# Altium footprint library WR-PHD_Socket Header.PcbLib: 279 footprints (part 1 of 18)
Each footprint in its own frame and in the unit in brackets; x right, y up, seen from the top. Pads: shape width x height; smd on the part's side, far side on the other; paste and mask are expansions set on the pad; w line width, h text height; cw(c..) or ccw(c..) is an arc to the next point about the centre after c.
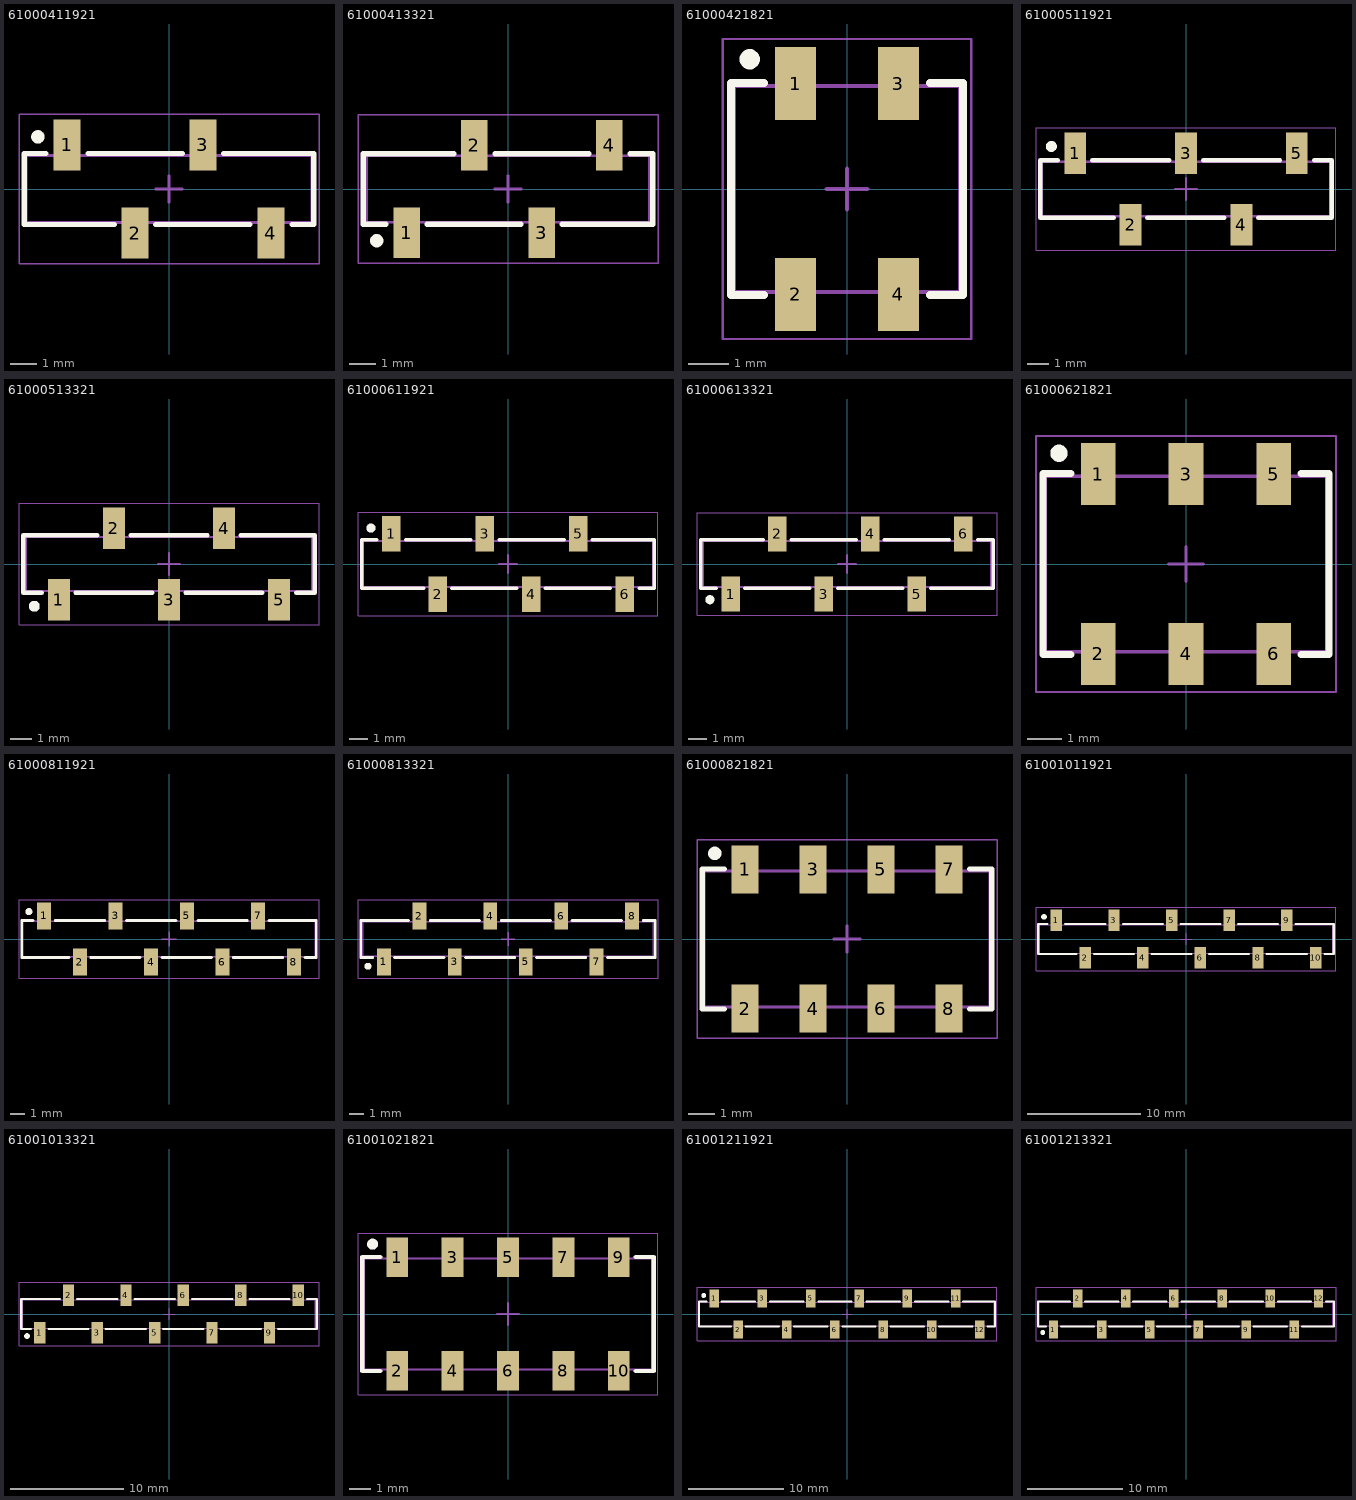
[diagram p0: the footprints below, top view; thin cyan lines are the x and y axes]

## 61000411921 [mm] "Socket Header, Pitch 2.54 mm, SMT, Vertical, single row, 4p"
height 7.5
pads (4):
  rect 1x1.91 smd: 1(-3.81,1.645) 2(-1.27,-1.645) 3(1.27,1.645) 4(3.81,-1.645)
Top Overlay:
  circle w0.25: c-4.9,1.95 r0.125
  lines w0.2: -4.6,1.325 -5.405,1.325 -5.405,-1.325 -2.04,-1.325 ; -3.02,1.325 0.5,1.325 ; -0.5,-1.325 3.02,-1.325 ; 2.04,1.325 5.405,1.325 5.405,-1.325 4.6,-1.325
Top Component Outline:
  lines w0.1: -4.06,1.25 -4.06,2.025 -3.56,2.025 -3.56,1.25 ; -1.52,-1.25 -1.52,-2.025 -1.02,-2.025 -1.02,-1.25 ; 1.02,1.25 1.02,2.025 1.52,2.025 1.52,1.25 ; 3.56,-1.25 3.56,-2.025 4.06,-2.025 4.06,-1.25 ; -5.33,-1.25 -5.33,1.25 5.33,1.25 5.33,-1.25 -5.33,-1.25
Top Designator:
  text ".Designator" at -3.647,-0.357 h1
Top Courtyard:
  lines w0.05: -5.605,-2.8 5.605,-2.8 5.605,2.8 -5.605,2.8 -5.605,-2.8
Top Component Center:
  lines w0.1: -0.5,0 0.5,0 ; 0,-0.5 0,0.5
3D body "61000411921.stp": height 7.5, standoff 0, extent -5.33,-2.025 5.33,2.025

## 61000413321 [mm] "Socket Header, Pitch 2.54 mm, SMT, Vertical, single row, 4p"
height 7.5
pads (4):
  rect 1x1.91 smd: 1(-3.81,-1.645) 2(-1.27,1.645) 3(1.27,-1.645) 4(3.81,1.645)
Top Overlay:
  circle w0.25: c-4.95,-1.95 r0.125
  lines w0.2: -4.6,-1.325 -5.455,-1.325 -5.455,1.325 -2.05,1.325 ; -3.05,-1.325 0.49,-1.325 ; -0.49,1.325 3.05,1.325 ; 2.05,-1.325 5.405,-1.325 ; 4.6,1.325 5.405,1.325 ; 5.455,-1.325 5.455,1.325
Top Component Outline:
  lines w0.1: -4.06,-1.25 -4.06,-2.025 -3.56,-2.025 -3.56,-1.25 ; -1.52,1.25 -1.52,2.025 -1.02,2.025 -1.02,1.25 ; 1.02,-1.25 1.02,-2.025 1.52,-2.025 1.52,-1.25 ; 3.56,1.25 3.56,2.025 4.06,2.025 4.06,1.25 ; -5.33,-1.25 -5.33,1.25 5.33,1.25 5.33,-1.25 -5.33,-1.25
Top Designator:
  text ".Designator" at -3.647,-0.357 h1
Top Courtyard:
  lines w0.05: -5.655,-2.8 5.655,-2.8 5.655,2.8 -5.655,2.8 -5.655,-2.8
Top Component Center:
  lines w0.1: -0.5,0 0.5,0 ; 0,-0.5 0,0.5
3D body "61000413321.stp": height 7.5, standoff 0, extent -5.33,-2.025 5.33,2.025

## 61000421821 [mm] "Socket Header, Pitch 2.54 mm, SMT, Vertical, dual row, 4p"
height 7.45
pads (4):
  rect 1x1.8 smd: 1(-1.27,2.6) 2(-1.27,-2.6) 3(1.27,2.6) 4(1.27,-2.6)
Top Overlay:
  circle w0.25: c-2.4,3.2 r0.125
  lines w0.2: -2.05,-2.615 -2.865,-2.615 -2.865,2.615 -2.05,2.615 ; 2.05,-2.615 2.865,-2.615 2.865,2.615 2.05,2.615
Top Component Outline:
  lines w0.1: -1.59,-2.54 -1.59,-3.35 -0.95,-3.35 -0.95,-2.54 ; -1.59,2.54 -1.59,3.35 -0.95,3.35 -0.95,2.54 ; 0.95,-2.54 0.95,-3.35 1.59,-3.35 1.59,-2.54 ; 0.95,2.54 0.95,3.35 1.59,3.35 1.59,2.54 ; -2.79,-2.54 2.79,-2.54 2.79,2.54 -2.79,2.54 -2.79,-2.54
Top Designator:
  text ".Designator" at -3.647,-0.357 h1
Top Courtyard:
  lines w0.05: -3.065,-3.7 -3.065,3.7 3.065,3.7 3.065,-3.7 -3.065,-3.7
Top Component Center:
  lines w0.1: -0.5,0 0.5,0 ; 0,-0.5 0,0.5
3D body "61000421821.stp": height 8.5, standoff 0, extent -2.54,-3.35 2.54,3.35

## 61000511921 [mm] "Socket Header, Pitch 2.54 mm, SMT, Vertical, single row, 5p"
height 7.5
pads (5):
  rect 1x1.91 smd: 1(-5.08,1.645) 2(-2.54,-1.645) 3(0,1.645) 4(2.54,-1.645) 5(5.08,1.645)
Top Overlay:
  circle w0.25: c-6.17,1.95 r0.125
  lines w0.2: -5.87,1.325 -6.675,1.325 -6.675,-1.325 -3.31,-1.325 ; -4.29,1.325 -0.77,1.325 ; -1.77,-1.325 1.75,-1.325 ; 0.79,1.325 4.31,1.325 ; 3.31,-1.325 6.675,-1.325 6.675,1.325 5.87,1.325
Top Component Outline:
  lines w0.1: -5.33,1.25 -5.33,2.025 -4.83,2.025 -4.83,1.25 ; -2.79,-1.25 -2.79,-2.025 -2.29,-2.025 -2.29,-1.25 ; -0.25,1.25 -0.25,2.025 0.25,2.025 0.25,1.25 ; 2.29,-1.25 2.29,-2.025 2.79,-2.025 2.79,-1.25 ; 4.83,1.25 4.83,2.025 5.33,2.025 5.33,1.25 ; -6.6,-1.25 6.6,-1.25 6.6,1.25 -6.6,1.25 -6.6,-1.25
Top Designator:
  text ".Designator" at -3.647,-0.357 h1
Top Courtyard:
  lines w0.05: -6.875,-2.8 6.875,-2.8 6.875,2.8 -6.875,2.8 -6.875,-2.8
Top Component Center:
  lines w0.1: -0.5,0 0.5,0 ; 0,-0.5 0,0.5
3D body "61000511921.stp": height 7.5, standoff 0, extent -6.6,-2.025 6.6,2.025

## 61000513321 [mm] "Socket Header, Pitch 2.54 mm, SMT, Vertical, single row, 5p"
height 7.5
pads (5):
  rect 1x1.91 smd: 1(-5.08,-1.645) 2(-2.54,1.645) 3(0,-1.645) 4(2.54,1.645) 5(5.08,-1.645)
Top Overlay:
  circle w0.25: c-6.22,-1.95 r0.125
  lines w0.2: -5.87,-1.325 -6.725,-1.325 -6.725,1.325 -3.32,1.325 ; -4.32,-1.325 -0.78,-1.325 ; -1.76,1.325 1.78,1.325 ; 0.76,-1.325 4.3,-1.325 ; 3.32,1.325 6.725,1.325 6.725,-1.325 5.87,-1.325
Top Component Outline:
  lines w0.1: -5.33,-1.25 -5.33,-2.025 -4.83,-2.025 -4.83,-1.25 ; -2.79,1.25 -2.79,2.025 -2.29,2.025 -2.29,1.25 ; -0.25,-1.25 -0.25,-2.025 0.25,-2.025 0.25,-1.25 ; 2.29,1.25 2.29,2.025 2.79,2.025 2.79,1.25 ; 4.83,-1.25 4.83,-2.025 5.33,-2.025 5.33,-1.25 ; -6.6,-1.25 6.6,-1.25 6.6,1.25 -6.6,1.25 -6.6,-1.25
Top Designator:
  text ".Designator" at -3.647,-0.357 h1
Top Courtyard:
  lines w0.05: -6.925,-2.8 -6.925,2.8 6.925,2.8 6.925,-2.8 -6.925,-2.8
Top Component Center:
  lines w0.1: -0.5,0 0.5,0 ; 0,-0.5 0,0.5
3D body "61000513321.stp": height 7.5, standoff 0, extent -6.6,-2.025 6.6,2.025

## 61000611921 [mm] "Socket Header, Pitch 2.54 mm, SMT, Vertical, single row, 6p"
height 7.5
pads (6):
  rect 1x1.91 smd: 1(-6.35,1.645) 2(-3.81,-1.645) 3(-1.27,1.645) 4(1.27,-1.645) 5(3.81,1.645) 6(6.35,-1.645)
Top Overlay:
  circle w0.25: c-7.44,1.95 r0.125
  lines w0.2: -7.14,1.325 -7.945,1.325 -7.945,-1.325 -4.58,-1.325 ; -5.56,1.325 -2.04,1.325 ; -3.04,-1.325 0.48,-1.325 ; -0.48,1.325 3.04,1.325 ; 2.04,-1.325 5.56,-1.325 ; 4.58,1.325 7.945,1.325 7.945,-1.325 7.14,-1.325
Top Component Outline:
  lines w0.1: -6.6,1.25 -6.6,2.025 -6.1,2.025 -6.1,1.25 ; -4.06,-1.25 -4.06,-2.025 -3.56,-2.025 -3.56,-1.25 ; -1.52,1.25 -1.52,2.025 -1.02,2.025 -1.02,1.25 ; 1.02,-1.25 1.02,-2.025 1.52,-2.025 1.52,-1.25 ; 3.56,1.25 3.56,2.025 4.06,2.025 4.06,1.25 ; 6.1,-1.25 6.1,-2.025 6.6,-2.025 6.6,-1.25 ; -7.87,-1.25 -7.87,1.25 7.87,1.25 7.87,-1.25 -7.87,-1.25
Top Designator:
  text ".Designator" at -3.647,-0.357 h1
Top Courtyard:
  lines w0.05: -8.145,-2.8 8.145,-2.8 8.145,2.8 -8.145,2.8 -8.145,-2.8
Top Component Center:
  lines w0.1: -0.5,0 0.5,0 ; 0,-0.5 0,0.5
3D body "61000611921.stp": height 7.5, standoff 0, extent -7.87,-2.025 7.87,2.025

## 61000613321 [mm] "Socket Header, Pitch 2.54 mm, SMT, Vertical, single row, 6p"
height 7.5
pads (6):
  rect 1x1.91 smd: 1(-6.35,-1.645) 2(-3.81,1.645) 3(-1.27,-1.645) 4(1.27,1.645) 5(3.81,-1.645) 6(6.35,1.645)
Top Overlay:
  circle w0.25: c-7.49,-1.95 r0.125
  lines w0.2: -7.14,-1.325 -7.995,-1.325 -7.995,1.325 -4.59,1.325 ; -5.59,-1.325 -2.05,-1.325 ; -3.03,1.325 0.51,1.325 ; -0.51,-1.325 3.03,-1.325 ; 2.05,1.325 5.59,1.325 ; 4.59,-1.325 7.995,-1.325 7.995,1.325 7.14,1.325
Top Component Outline:
  lines w0.1: -6.6,-1.25 -6.6,-2.025 -6.1,-2.025 -6.1,-1.25 ; -4.06,1.25 -4.06,2.025 -3.56,2.025 -3.56,1.25 ; -1.52,-1.25 -1.52,-2.025 -1.02,-2.025 -1.02,-1.25 ; 1.02,1.25 1.02,2.025 1.52,2.025 1.52,1.25 ; 3.56,-1.25 3.56,-2.025 4.06,-2.025 4.06,-1.25 ; 6.1,1.25 6.1,2.025 6.6,2.025 6.6,1.25 ; -7.87,-1.25 7.87,-1.25 7.87,1.25 -7.87,1.25 -7.87,-1.25
Top Designator:
  text ".Designator" at -3.647,-0.357 h1
Top Courtyard:
  lines w0.05: -8.195,-2.8 -8.195,2.8 8.195,2.8 8.195,-2.8 -8.195,-2.8
Top Component Center:
  lines w0.1: -0.5,0 0.5,0 ; 0,-0.5 0,0.5
3D body "61000613321.stp": height 7.5, standoff 0, extent -7.87,-2.025 7.87,2.025

## 61000621821 [mm] "Socket Header, Pitch 2.54 mm, SMT, Vertical, dual row, 6p"
height 7.45
pads (6):
  rect 1x1.8 smd: 1(-2.54,2.6) 2(-2.54,-2.6) 3(0,2.6) 4(0,-2.6) 5(2.54,2.6) 6(2.54,-2.6)
Top Overlay:
  circle w0.25: c-3.67,3.2 r0.125
  lines w0.2: -3.32,-2.615 -4.135,-2.615 -4.135,2.615 -3.32,2.615 ; 3.32,-2.615 4.135,-2.615 4.135,2.615 3.32,2.615
Top Component Outline:
  lines w0.1: -2.86,-2.54 -2.86,-3.35 -2.22,-3.35 -2.22,-2.54 ; -2.86,2.54 -2.86,3.35 -2.22,3.35 -2.22,2.54 ; -0.32,-2.54 -0.32,-3.35 0.32,-3.35 0.32,-2.54 ; -0.32,2.54 -0.32,3.35 0.32,3.35 0.32,2.54 ; 2.22,-2.54 2.22,-3.35 2.86,-3.35 2.86,-2.54 ; 2.22,2.54 2.22,3.35 2.86,3.35 2.86,2.54 ; -4.06,-2.54 4.06,-2.54 4.06,2.54 -4.06,2.54 -4.06,-2.54
Top Designator:
  text ".Designator" at -3.647,-0.357 h1
Top Courtyard:
  lines w0.05: -4.335,-3.7 4.335,-3.7 4.335,3.7 -4.335,3.7 -4.335,-3.7
Top Component Center:
  lines w0.1: -0.5,0 0.5,0 ; 0,-0.5 0,0.5
3D body "61000621821.stp": height 8.5, standoff 0, extent -4,-3.35 4,3.35

## 61000811921 [mm] "Socket Header, Pitch 2.54 mm, SMT, Vertical, single row, 8p"
height 7.5
pads (8):
  rect 1x1.91 smd: 1(-8.89,1.645) 2(-6.35,-1.645) 3(-3.81,1.645) 4(-1.27,-1.645) 5(1.27,1.645) 6(3.81,-1.645) 7(6.35,1.645) 8(8.89,-1.645)
Top Overlay:
  circle w0.25: c-9.98,1.95 r0.125
  lines w0.2: -9.68,1.325 -10.485,1.325 -10.485,-1.325 -7.12,-1.325 ; -8.1,1.325 -4.58,1.325 ; -5.58,-1.325 -2.06,-1.325 ; -3.02,1.325 0.5,1.325 ; -0.5,-1.325 3.02,-1.325 ; 2.06,1.325 5.58,1.325 ; 4.58,-1.325 8.1,-1.325 ; 7.12,1.325 10.485,1.325 10.485,-1.325 9.68,-1.325
Top Component Outline:
  lines w0.1: -9.14,1.25 -9.14,2.025 -8.64,2.025 -8.64,1.25 ; -6.6,-1.25 -6.6,-2.025 -6.1,-2.025 -6.1,-1.25 ; -4.06,1.25 -4.06,2.025 -3.56,2.025 -3.56,1.25 ; -1.52,-1.25 -1.52,-2.025 -1.02,-2.025 -1.02,-1.25 ; 1.02,1.25 1.02,2.025 1.52,2.025 1.52,1.25 ; 3.56,-1.25 3.56,-2.025 4.06,-2.025 4.06,-1.25 ; 6.1,1.25 6.1,2.025 6.6,2.025 6.6,1.25 ; 8.64,-1.25 8.64,-2.025 9.14,-2.025 9.14,-1.25 ; -10.41,-1.25 -10.41,1.25 10.41,1.25 10.41,-1.25 -10.41,-1.25
Top Designator:
  text ".Designator" at -3.647,-0.357 h1
Top Courtyard:
  lines w0.05: -10.685,-2.8 -10.685,2.8 10.685,2.8 10.685,-2.8 -10.685,-2.8
Top Component Center:
  lines w0.1: -0.5,0 0.5,0 ; 0,-0.5 0,0.5
3D body "61000811921.stp": height 7.5, standoff 0, extent -10.41,-2.025 10.41,2.025

## 61000813321 [mm] "Socket Header, Pitch 2.54 mm, SMT, Vertical, single row, 8p"
height 7.5
pads (8):
  rect 1x1.91 smd: 1(-8.89,-1.645) 2(-6.35,1.645) 3(-3.81,-1.645) 4(-1.27,1.645) 5(1.27,-1.645) 6(3.81,1.645) 7(6.35,-1.645) 8(8.89,1.645)
Top Overlay:
  circle w0.25: c-10.03,-1.95 r0.125
  lines w0.2: -9.68,-1.325 -10.535,-1.325 -10.535,1.325 -7.13,1.325 ; -8.13,-1.325 -4.59,-1.325 ; -5.57,1.325 -2.03,1.325 ; -3.05,-1.325 0.49,-1.325 ; -0.49,1.325 3.05,1.325 ; 2.03,-1.325 5.57,-1.325 ; 4.59,1.325 8.13,1.325 ; 7.13,-1.325 10.535,-1.325 10.535,1.325 9.68,1.325
Top Component Outline:
  lines w0.1: -9.14,-1.25 -9.14,-2.025 -8.64,-2.025 -8.64,-1.25 ; -6.6,1.25 -6.6,2.025 -6.1,2.025 -6.1,1.25 ; -4.06,-1.25 -4.06,-2.025 -3.56,-2.025 -3.56,-1.25 ; -1.52,1.25 -1.52,2.025 -1.02,2.025 -1.02,1.25 ; 1.02,-1.25 1.02,-2.025 1.52,-2.025 1.52,-1.25 ; 3.56,1.25 3.56,2.025 4.06,2.025 4.06,1.25 ; 6.1,-1.25 6.1,-2.025 6.6,-2.025 6.6,-1.25 ; 8.64,1.25 8.64,2.025 9.14,2.025 9.14,1.25 ; -10.41,-1.25 -10.41,1.25 10.41,1.25 10.41,-1.25 -10.41,-1.25
Top Designator:
  text ".Designator" at -3.647,-0.357 h1
Top Courtyard:
  lines w0.05: -10.735,-2.8 10.735,-2.8 10.735,2.8 -10.735,2.8 -10.735,-2.8
Top Component Center:
  lines w0.1: -0.5,0 0.5,0 ; 0,-0.5 0,0.5
3D body "61000813321.stp": height 7.5, standoff 0, extent -10.41,-2.025 10.41,2.025

## 61000821821 [mm] "Socket Header, Pitch 2.54 mm, SMT, Vertical, dual row, 8p"
height 7.45
pads (8):
  rect 1x1.8 smd: 1(-3.81,2.6) 2(-3.81,-2.6) 3(-1.27,2.6) 4(-1.27,-2.6) 5(1.27,2.6) 6(1.27,-2.6) 7(3.81,2.6) 8(3.81,-2.6)
Top Overlay:
  circle w0.25: c-4.94,3.2 r0.125
  lines w0.2: -4.59,-2.615 -5.405,-2.615 -5.405,2.615 -4.59,2.615 ; 4.59,-2.615 5.405,-2.615 5.405,2.615 4.59,2.615
Top Component Outline:
  lines w0.1: -4.13,-2.54 -4.13,-3.35 -3.49,-3.35 -3.49,-2.54 ; -4.13,2.54 -4.13,3.35 -3.49,3.35 -3.49,2.54 ; -1.59,-2.54 -1.59,-3.35 -0.95,-3.35 -0.95,-2.54 ; -1.59,2.54 -1.59,3.35 -0.95,3.35 -0.95,2.54 ; 0.95,-2.54 0.95,-3.35 1.59,-3.35 1.59,-2.54 ; 0.95,2.54 0.95,3.35 1.59,3.35 1.59,2.54 ; 3.49,-2.54 3.49,-3.35 4.13,-3.35 4.13,-2.54 ; 3.49,2.54 3.49,3.35 4.13,3.35 4.13,2.54 ; -5.33,-2.54 -5.33,2.54 5.33,2.54 5.33,-2.54 -5.33,-2.54
Top Designator:
  text ".Designator" at -3.647,-0.357 h1
Top Courtyard:
  lines w0.05: -5.605,-3.7 -5.605,3.7 5.605,3.7 5.605,-3.7 -5.605,-3.7
Top Component Center:
  lines w0.1: -0.5,0 0.5,0 ; 0,-0.5 0,0.5
3D body "61000821821.stp": height 8.5, standoff 0, extent -5.08,-3.35 5.08,3.35

## 61001011921 [mm] "Socket Header, Pitch 2.54 mm, SMT, Vertical, single row, 10p"
height 7.5
pads (10):
  rect 1x1.91 smd: 1(-11.43,1.645) 2(-8.89,-1.645) 3(-6.35,1.645) 4(-3.81,-1.645) 5(-1.27,1.645) 6(1.27,-1.645) 7(3.81,1.645) 8(6.35,-1.645) 9(8.89,1.645) 10(11.43,-1.645)
Top Overlay:
  circle w0.25: c-12.52,1.95 r0.125
  lines w0.2: -12.22,1.325 -13.025,1.325 -13.025,-1.325 -9.66,-1.325 ; -10.64,1.325 -7.12,1.325 ; -8.12,-1.325 -4.6,-1.325 ; -5.56,1.325 -2.04,1.325 ; -3.04,-1.325 0.48,-1.325 ; -0.48,1.325 3.04,1.325 ; 2.04,-1.325 5.56,-1.325 ; 4.6,1.325 8.12,1.325 ; 7.12,-1.325 10.64,-1.325 ; 9.66,1.325 13.025,1.325 13.025,-1.325 12.22,-1.325
Top Component Outline:
  lines w0.1: -11.68,1.25 -11.68,2.025 -11.18,2.025 -11.18,1.25 ; -9.14,-1.25 -9.14,-2.025 -8.64,-2.025 -8.64,-1.25 ; -6.6,1.25 -6.6,2.025 -6.1,2.025 -6.1,1.25 ; -4.06,-1.25 -4.06,-2.025 -3.56,-2.025 -3.56,-1.25 ; -1.52,1.25 -1.52,2.025 -1.02,2.025 -1.02,1.25 ; 1.02,-1.25 1.02,-2.025 1.52,-2.025 1.52,-1.25 ; 3.56,1.25 3.56,2.025 4.06,2.025 4.06,1.25 ; 6.1,-1.25 6.1,-2.025 6.6,-2.025 6.6,-1.25 ; 8.64,1.25 8.64,2.025 9.14,2.025 9.14,1.25 ; 11.18,-1.25 11.18,-2.025 11.68,-2.025 11.68,-1.25 ; -12.95,-1.25 -12.95,1.25 12.95,1.25 12.95,-1.25 -12.95,-1.25
Top Designator:
  text ".Designator" at -3.647,-0.357 h1
Top Courtyard:
  lines w0.05: -13.225,-2.8 -13.225,2.8 13.225,2.8 13.225,-2.8 -13.225,-2.8
Top Component Center:
  lines w0.1: -0.5,0 0.5,0 ; 0,-0.5 0,0.5
3D body "61001011921.stp": height 7.5, standoff 0, extent -12.95,-2.025 12.95,2.025

## 61001013321 [mm] "Socket Header, Pitch 2.54 mm, SMT, Vertical, single row, 10p"
height 7.5
pads (10):
  rect 1x1.91 smd: 1(-11.43,-1.645) 2(-8.89,1.645) 3(-6.35,-1.645) 4(-3.81,1.645) 5(-1.27,-1.645) 6(1.27,1.645) 7(3.81,-1.645) 8(6.35,1.645) 9(8.89,-1.645) 10(11.43,1.645)
Top Overlay:
  circle w0.25: c-12.57,-1.95 r0.125
  lines w0.2: -12.22,-1.325 -13.075,-1.325 -13.075,1.325 -9.67,1.325 ; -10.67,-1.325 -7.13,-1.325 ; -8.11,1.325 -4.57,1.325 ; -5.59,-1.325 -2.05,-1.325 ; -3.03,1.325 0.51,1.325 ; -0.51,-1.325 3.03,-1.325 ; 2.05,1.325 5.59,1.325 ; 4.57,-1.325 8.11,-1.325 ; 7.13,1.325 10.67,1.325 ; 9.67,-1.325 13.075,-1.325 13.075,1.325 12.22,1.325
Top Component Outline:
  lines w0.1: -11.68,-1.25 -11.68,-2.025 -11.18,-2.025 -11.18,-1.25 ; -9.14,1.25 -9.14,2.025 -8.64,2.025 -8.64,1.25 ; -6.6,-1.25 -6.6,-2.025 -6.1,-2.025 -6.1,-1.25 ; -4.06,1.25 -4.06,2.025 -3.56,2.025 -3.56,1.25 ; -1.52,-1.25 -1.52,-2.025 -1.02,-2.025 -1.02,-1.25 ; 1.02,1.25 1.02,2.025 1.52,2.025 1.52,1.25 ; 3.56,-1.25 3.56,-2.025 4.06,-2.025 4.06,-1.25 ; 6.1,1.25 6.1,2.025 6.6,2.025 6.6,1.25 ; 8.64,-1.25 8.64,-2.025 9.14,-2.025 9.14,-1.25 ; 11.18,1.25 11.18,2.025 11.68,2.025 11.68,1.25 ; -12.95,-1.25 12.95,-1.25 12.95,1.25 -12.95,1.25 -12.95,-1.25
Top Designator:
  text ".Designator" at -3.647,-0.357 h1
Top Courtyard:
  lines w0.05: -13.275,-2.8 13.275,-2.8 13.275,2.8 -13.275,2.8 -13.275,-2.8
Top Component Center:
  lines w0.1: -0.5,0 0.5,0 ; 0,-0.5 0,0.5
3D body "61001013321.stp": height 7.5, standoff 0, extent -12.95,-2.025 12.95,2.025

## 61001021821 [mm] "Socket Header, Pitch 2.54 mm, SMT, Vertical, dual row, 10p"
height 7.45
pads (10):
  rect 1x1.8 smd: 1(-5.08,2.6) 2(-5.08,-2.6) 3(-2.54,2.6) 4(-2.54,-2.6) 5(0,2.6) 6(0,-2.6) 7(2.54,2.6) 8(2.54,-2.6) 9(5.08,2.6) 10(5.08,-2.6)
Top Overlay:
  circle w0.25: c-6.21,3.2 r0.125
  lines w0.2: -5.86,-2.615 -6.675,-2.615 -6.675,2.615 -5.86,2.615 ; 5.86,-2.615 6.675,-2.615 6.675,2.615 5.86,2.615
Top Component Outline:
  lines w0.1: -5.4,-2.54 -5.4,-3.35 -4.76,-3.35 -4.76,-2.54 ; -5.4,2.54 -5.4,3.35 -4.76,3.35 -4.76,2.54 ; -2.86,-2.54 -2.86,-3.35 -2.22,-3.35 -2.22,-2.54 ; -2.86,2.54 -2.86,3.35 -2.22,3.35 -2.22,2.54 ; -0.32,-2.54 -0.32,-3.35 0.32,-3.35 0.32,-2.54 ; -0.32,2.54 -0.32,3.35 0.32,3.35 0.32,2.54 ; 2.22,-2.54 2.22,-3.35 2.86,-3.35 2.86,-2.54 ; 2.22,2.54 2.22,3.35 2.86,3.35 2.86,2.54 ; 4.76,-2.54 4.76,-3.35 5.4,-3.35 5.4,-2.54 ; 4.76,2.54 4.76,3.35 5.4,3.35 5.4,2.54 ; -6.6,-2.54 6.6,-2.54 6.6,2.54 -6.6,2.54 -6.6,-2.54
Top Designator:
  text ".Designator" at -3.647,-0.357 h1
Top Courtyard:
  lines w0.05: -6.875,-3.7 -6.875,3.7 6.875,3.7 6.875,-3.7 -6.875,-3.7
Top Component Center:
  lines w0.1: -0.5,0 0.5,0 ; 0,-0.5 0,0.5
3D body "61001021821.stp": height 8.5, standoff 0, extent -6.35,-3.35 6.35,3.35

## 61001211921 [mm] "Socket Header, Pitch 2.54 mm, SMT, Vertical, single row, 12p"
height 7.5
pads (12):
  rect 1x1.91 smd: 1(-13.97,1.645) 2(-11.43,-1.645) 3(-8.89,1.645) 4(-6.35,-1.645) 5(-3.81,1.645) 6(-1.27,-1.645) 7(1.27,1.645) 8(3.81,-1.645) 9(6.35,1.645) 10(8.89,-1.645) 11(11.43,1.645) 12(13.97,-1.645)
Top Overlay:
  circle w0.25: c-15.06,1.95 r0.125
  lines w0.2: -14.76,1.325 -15.565,1.325 -15.565,-1.325 -12.2,-1.325 ; -13.18,1.325 -9.66,1.325 ; -10.66,-1.325 -7.14,-1.325 ; -8.1,1.325 -4.58,1.325 ; -5.58,-1.325 -2.06,-1.325 ; -3.02,1.325 0.5,1.325 ; -0.5,-1.325 3.02,-1.325 ; 2.06,1.325 5.58,1.325 ; 4.58,-1.325 8.1,-1.325 ; 7.14,1.325 10.66,1.325 ; 9.66,-1.325 13.18,-1.325 ; 12.2,1.325 15.565,1.325 15.565,-1.325 14.76,-1.325
Top Component Outline:
  lines w0.1: -14.22,1.25 -14.22,2.025 -13.72,2.025 -13.72,1.25 ; -11.68,-1.25 -11.68,-2.025 -11.18,-2.025 -11.18,-1.25 ; -9.14,1.25 -9.14,2.025 -8.64,2.025 -8.64,1.25 ; -6.6,-1.25 -6.6,-2.025 -6.1,-2.025 -6.1,-1.25 ; -4.06,1.25 -4.06,2.025 -3.56,2.025 -3.56,1.25 ; -1.52,-1.25 -1.52,-2.025 -1.02,-2.025 -1.02,-1.25 ; 1.02,1.25 1.02,2.025 1.52,2.025 1.52,1.25 ; 3.56,-1.25 3.56,-2.025 4.06,-2.025 4.06,-1.25 ; 6.1,1.25 6.1,2.025 6.6,2.025 6.6,1.25 ; 8.64,-1.25 8.64,-2.025 9.14,-2.025 9.14,-1.25 ; 11.18,1.25 11.18,2.025 11.68,2.025 11.68,1.25 ; 13.72,-1.25 13.72,-2.025 14.22,-2.025 14.22,-1.25 ; -15.49,-1.25 15.49,-1.25 15.49,1.25 -15.49,1.25 -15.49,-1.25
Top Designator:
  text ".Designator" at -3.647,-0.357 h1
Top Courtyard:
  lines w0.05: -15.765,-2.8 -15.765,2.8 15.765,2.8 15.765,-2.8 -15.765,-2.8
Top Component Center:
  lines w0.1: -0.5,0 0.5,0 ; 0,-0.5 0,0.5
3D body "61001211921.stp": height 7.5, standoff 0, extent -15.49,-2.025 15.49,2.025

## 61001213321 [mm] "Socket Header, Pitch 2.54 mm, SMT, Vertical, single row, 12p"
height 7.5
pads (12):
  rect 1x1.91 smd: 1(-13.97,-1.645) 2(-11.43,1.645) 3(-8.89,-1.645) 4(-6.35,1.645) 5(-3.81,-1.645) 6(-1.27,1.645) 7(1.27,-1.645) 8(3.81,1.645) 9(6.35,-1.645) 10(8.89,1.645) 11(11.43,-1.645) 12(13.97,1.645)
Top Overlay:
  circle w0.25: c-15.11,-1.95 r0.125
  lines w0.2: -14.76,-1.325 -15.615,-1.325 -15.615,1.325 -12.21,1.325 ; -13.21,-1.325 -9.67,-1.325 ; -10.65,1.325 -7.11,1.325 ; -8.13,-1.325 -4.59,-1.325 ; -5.57,1.325 -2.03,1.325 ; -3.05,-1.325 0.49,-1.325 ; -0.49,1.325 3.05,1.325 ; 2.03,-1.325 5.57,-1.325 ; 4.59,1.325 8.13,1.325 ; 7.11,-1.325 10.65,-1.325 ; 9.67,1.325 13.21,1.325 ; 12.21,-1.325 15.615,-1.325 15.615,1.325 14.76,1.325
Top Component Outline:
  lines w0.1: -14.22,-1.25 -14.22,-2.025 -13.72,-2.025 -13.72,-1.25 ; -11.68,1.25 -11.68,2.025 -11.18,2.025 -11.18,1.25 ; -9.14,-1.25 -9.14,-2.025 -8.64,-2.025 -8.64,-1.25 ; -6.6,1.25 -6.6,2.025 -6.1,2.025 -6.1,1.25 ; -4.06,-1.25 -4.06,-2.025 -3.56,-2.025 -3.56,-1.25 ; -1.52,1.25 -1.52,2.025 -1.02,2.025 -1.02,1.25 ; 1.02,-1.25 1.02,-2.025 1.52,-2.025 1.52,-1.25 ; 3.56,1.25 3.56,2.025 4.06,2.025 4.06,1.25 ; 6.1,-1.25 6.1,-2.025 6.6,-2.025 6.6,-1.25 ; 8.64,1.25 8.64,2.025 9.14,2.025 9.14,1.25 ; 11.18,-1.25 11.18,-2.025 11.68,-2.025 11.68,-1.25 ; 13.72,1.25 13.72,2.025 14.22,2.025 14.22,1.25 ; -15.49,-1.25 -15.49,1.25 15.49,1.25 15.49,-1.25 -15.49,-1.25
Top Designator:
  text ".Designator" at -3.647,-0.357 h1
Top Courtyard:
  lines w0.05: -15.815,-2.8 -15.815,2.8 15.815,2.8 15.815,-2.8 -15.815,-2.8
Top Component Center:
  lines w0.1: -0.5,0 0.5,0 ; 0,-0.5 0,0.5
3D body "61001213321.stp": height 7.5, standoff 0, extent -15.49,-2.025 15.49,2.025